# Altium footprint library PBL - THD Packages.PcbLib: 160 footprints (part 7 of 10)
Each footprint in its own frame and in the unit in brackets; x right, y up, seen from the top. Pads: shape width x height; smd on the part's side, far side on the other; paste and mask are expansions set on the pad; w line width, h text height; cw(c..) or ccw(c..) is an arc to the next point about the centre after c.
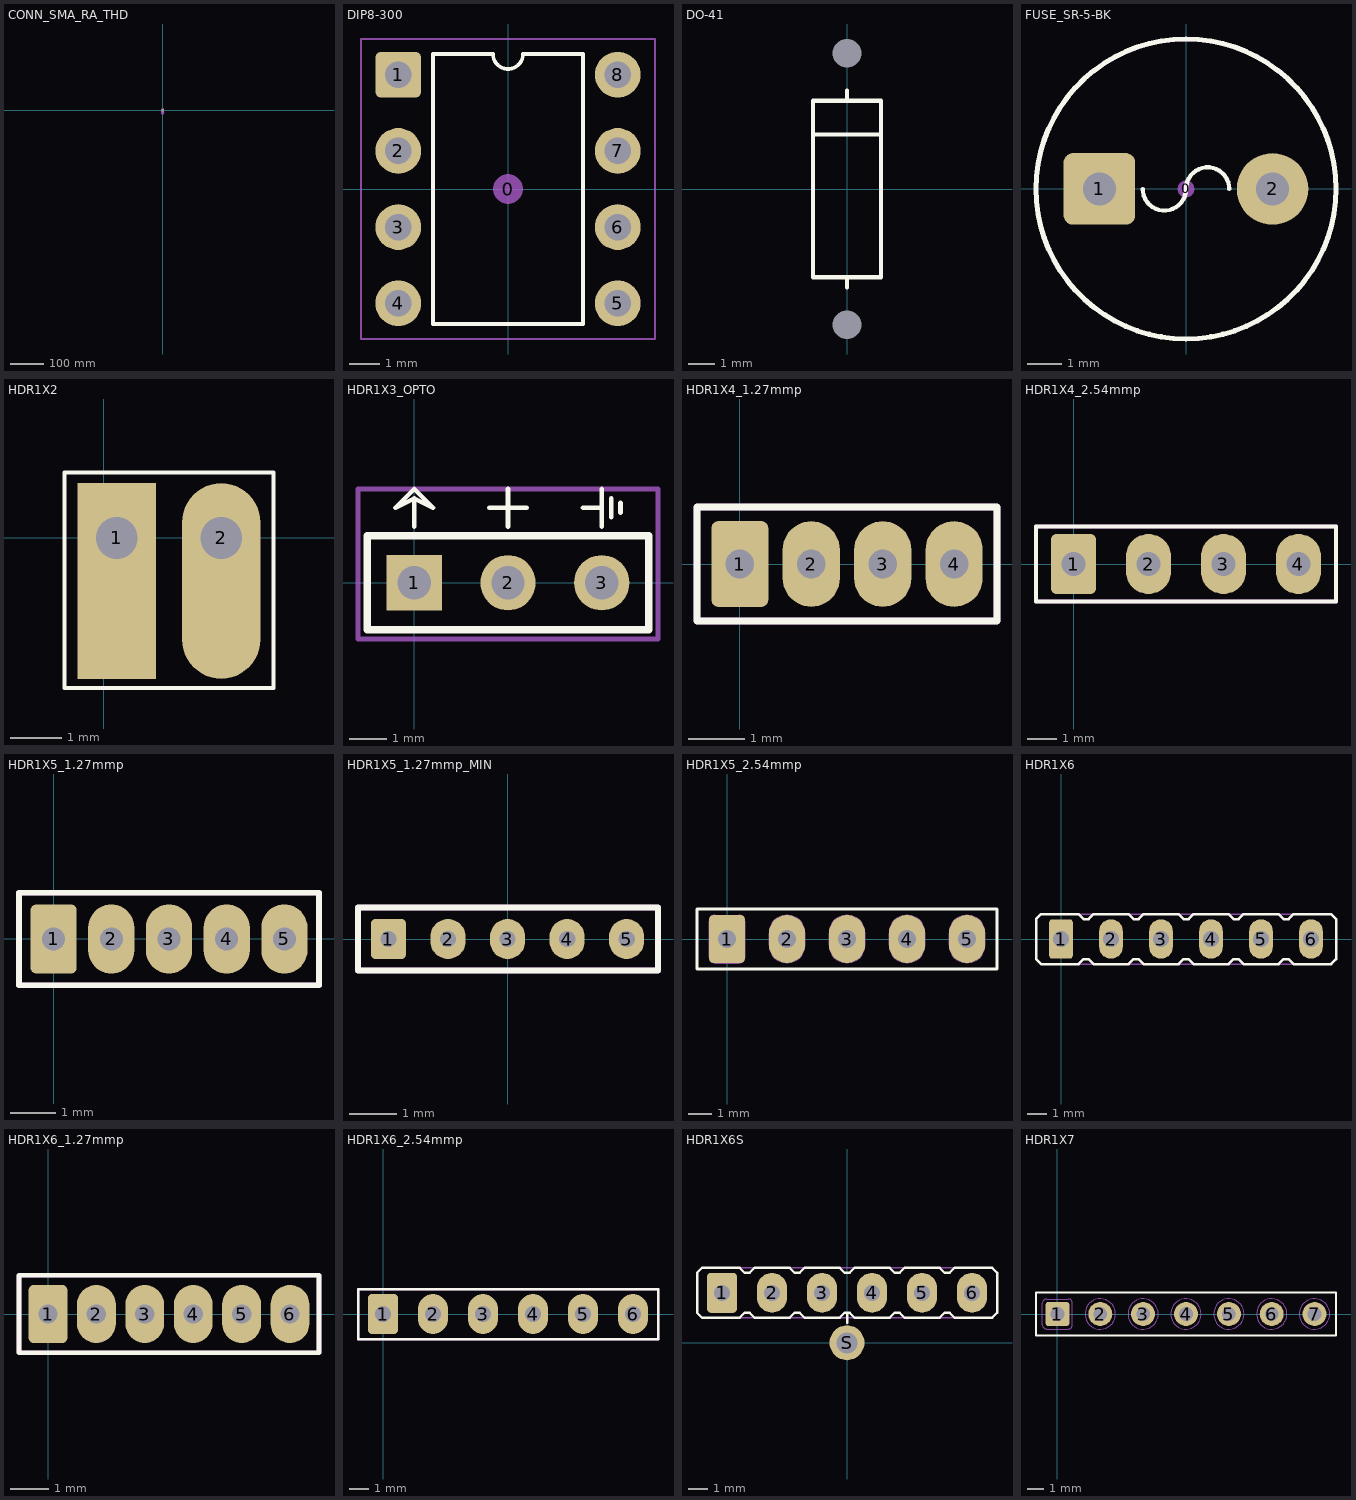
[diagram p6: the footprints below, top view; thin cyan lines are the x and y axes]

## CONN_SMA_RA_THD [mm]
height 10.43
pads (5):
  round 2.5 hole 1.5: 1(0,0)
  round 2.5 hole 1.6: 2(-2.54,-2.54) 2(-2.54,2.54) 2(2.54,-2.54) 2(2.54,2.54)
13 - 3D Top Side:
  drawing of 402 lines, arcs and shapes, not listed
3D body: height 10.43, standoff -3.41, extent -3.173,-11.05 3.167,3.15

## DIP8-300 [mil] "DIP, 8-Leads, 0.300\" lead span , 0.100\" lead pitch, IPC Density A"
height 210
pads (9):
  round 39.37 on Mech15: 0(0,0)
  rrect25% 60x60 hole 35: 1(-144,150)
  round 60 hole 35: 2(-144,50) 3(-144,-50) 4(-144,-150) 5(144,-150) 6(144,-50) 7(144,50) 8(144,150)
Top Overlay:
  lines w5: -98.43,-177.17 98.43,-177.17 98.43,177.17 19.69,177.17 cw(c0,177.17) -19.69,177.17 -98.43,177.17 -98.43,-177.17
13 - 3D Top Side:
  lines w3: -98.43,-177.17 -98.43,177.17 -19.69,177.17 ccw(c0,177.17) 19.69,177.17 98.43,177.17 98.43,-177.17 -98.43,-177.17
15 - Top Courtyards:
  lines w3: -192.91,-196.85 192.91,-196.85 192.91,196.85 -192.91,196.85 -192.91,-196.85
3D body: height 165, standoff -105, extent -149,-225 161,225

## DO-41 [mil] "Diode, thru-hole"
height 106.3
pads (2):
  round 0 / inner round 0 / far side round 100 hole 42 unplated: A(0,-200) K(0,200)
Top Overlay:
  lines w6: -50,80 50,80 ; 0,-145 0,-130 ; 0,130 0,145 ; -50,-130 50,-130 50,130 -50,130 -50,-130
3D body: height 100.5, standoff -100, extent -51,-215 50,215

## FUSE_SR-5-BK [mm]
height 9.3
pads (3):
  round 0.5 on Mech15: 0(0,0)
  rrect25% 2.1x2.1 hole 0.965: 1(-2.54,0)
  round 2.1 hole 0.965: 2(2.54,0)
Top Overlay:
  circle w0.152: c0,0 r4.4
  lines w0.127: -1.27,0 ccw(c-0.635,0) 0,0 cw(c0.635,0) 1.27,0
13 - 3D Top Side:
  circle w0.127: c0,-0.003 r4.4
3D body: height 8.29, standoff -2.55, extent -4.35,-4.321 4.35,4.315

## HDR1X2 [mil] "Connector; Header; 2 Position"
pads (2):
  rect 60x150 hole 32 copper offset 0,-33: 1(10,0)
  oval 60x150 hole 32 copper offset 0,-33: 2(90,0)
Top Overlay:
  lines w3: -30,-115 130,-115 130,50 -30,50 -30,-115

## HDR1X3_OPTO [mm] "Connector; Header; 3 Position"
pads (3):
  rect 1.5x1.5 hole 0.9: 1(0,0)
  round 1.5 hole 0.9: 2(2.54,0) 3(5.08,0)
Top Overlay:
  lines w0.127: 0,1.524 0,2.286 ; 2.032,2.032 3.048,2.032 ; 2.54,1.524 2.54,2.54 ; 4.572,2.032 5.08,2.032 5.08,2.54 5.08,1.524 ; 5.334,1.778 5.334,2.286 ; 5.588,1.905 5.588,2.159 ; 0,2.286 0.508,2.032 0,2.54 -0.508,2.032 0,2.286
  lines w0.2: -1.27,-1.27 6.35,-1.27 6.35,1.27 -1.27,1.27 -1.27,-1.27
15 - Top Courtyards:
  lines w0.127: -1.524,-1.524 6.604,-1.524 6.604,2.54 -1.524,2.54 -1.524,-1.524

## HDR1X4_1.27mmp [mil] "Connector; Header; 4 Position, 0.050\" pitch"
pads (4):
  rrect25% 40x60 hole 20: 1(0,0)
  oval 40x60 hole 20: 2(50,0) 3(100,0) 4(150,0)
Top Overlay:
  lines w5: -30,-40 -30,40 180,40 180,-40 -30,-40
13 - 3D Top Side:
  lines w5: -30,-40 -30,40 180,40 180,-40 -30,-40

## HDR1X4_2.54mmp [mil] "Connector; Header; 4 Position 0.100\" pitch"
pads (4):
  rrect25% 60x80 hole 32: 1(0,0)
  oval 60x80 hole 32: 2(100,0) 3(200,0) 4(300,0)
Top Overlay:
  lines w5: -50,-50 350,-50 350,50 -50,50 -50,-50
13 - 3D Top Side:
  lines w5: -50,-50 -50,50 350,50 350,-50 -50,-50

## HDR1X5_1.27mmp [mil] "Connector; Header; 5 Position, 0.050\" pitch"
pads (5):
  rrect25% 40x60 hole 20 mask+5: 1(0,0)
  oval 40x60 hole 20 mask+5: 2(50,0) 3(100,0) 4(150,0) 5(200,0)
Top Overlay:
  lines w5: -30,-40 230,-40 230,40 -30,40 -30,-40
13 - 3D Top Side:
  lines w5: -30,-40 230,-40 230,40 -30,40 -30,-40
3D body: height -3, standoff -5, extent -19.84,-19.96 20,19.96

## HDR1X5_1.27mmp_MIN [mm] "Programming connector target; 5 Position with minimally sized pads, 0.050\" pitch"
pads (5):
  rrect25% 0.75x0.85 hole 0.35 mask+0.1: 1(-2.54,0)
  oval 0.75x0.85 hole 0.35 mask+0.1: 2(-1.27,0) 3(0,0) 4(1.27,0) 5(2.54,0)
Top Overlay:
  lines w0.127: -3.19,-0.675 3.21,-0.675 3.21,0.675 -3.19,0.675 -3.19,-0.675
13 - 3D Top Side:
  lines w0.127: -3.19,-0.675 3.21,-0.675 3.21,0.675 -3.19,0.675 -3.19,-0.675
3D body: height -0.08, standoff -0.13, extent -3.044,-0.507 -2.032,0.507

## HDR1X5_2.54mmp [mil] "Connector; Header; 5 Position 0.100\" pitch"
pads (5):
  rrect25% 60x80 hole 30: 1(0,0)
  oval 60x80 hole 30: 2(100,0) 3(200,0) 4(300,0) 5(400,0)
Top Overlay:
  lines w5: -50,-50 -50,50 450,50 450,-50 -50,-50
13 - 3D Top Side:
  circle w1.97: c0,0 r15
  circle w1.97: c100,0 r15
  circle w1.97: c200,0 r15
  circle w1.97: c300,0 r15
  circle w1.97: c400,0 r15
  lines w1.97: -30,-30 ccw(c-20,-30) -20,-40 20,-40 ccw(c20,-30) 30,-30 30,30 ccw(c20,30) 20,40 -20,40 ccw(c-20,30) -30,30 -30,-30 ; 70,-10 ccw(c100,-10) 130,-10 130,10 ccw(c100,10) 70,10 70,-10 ; 170,-10 ccw(c200,-10) 230,-10 230,10 ccw(c200,10) 170,10 170,-10 ; 270,-10 ccw(c300,-10) 330,-10 330,10 ccw(c300,10) 270,10 270,-10 ; 370,-10 ccw(c400,-10) 430,-10 430,10 ccw(c400,10) 370,10 370,-10

## HDR1X6 [mm] "Connector; Header; 6 Position"
pads (6):
  rrect25% 1.2x2 hole 0.813: 1(0,0)
  oval 1.2x2 hole 0.813: 2(2.54,0) 3(5.08,0) 4(7.62,0) 5(10.16,0) 6(12.7,0)
Top Overlay:
  lines w0.127: -1.27,-1.016 -1.27,1.016 -1.016,1.27 0.889,1.27 1.143,1.016 1.397,1.016 1.651,1.27 3.429,1.27 3.683,1.016 3.937,1.016 4.191,1.27 5.969,1.27 6.223,1.016 6.477,1.016 6.731,1.27 8.509,1.27 8.763,1.016 9.017,1.016 9.271,1.27 11.049,1.27 11.303,1.016 11.557,1.016 11.811,1.27 13.716,1.27 13.97,1.016 13.97,-1.016 13.716,-1.27 11.811,-1.27 11.557,-1.016 11.303,-1.016 11.049,-1.27 9.271,-1.27 9.017,-1.016 8.763,-1.016 8.509,-1.27 6.731,-1.27 6.477,-1.016 6.223,-1.016 5.969,-1.27 4.191,-1.27 3.937,-1.016 3.683,-1.016 3.429,-1.27 1.651,-1.27 1.397,-1.016 1.143,-1.016 0.889,-1.27 -1.016,-1.27 -1.27,-1.016
13 - 3D Top Side:
  lines w0.076: -1.27,-1.016 -1.016,-1.27 13.716,-1.27 13.97,-1.016 13.97,1.016 13.716,1.27 -1.016,1.27 -1.27,1.016 -1.27,-1.016

## HDR1X6_1.27mmp [mil] "Connector; Header; 6 Position, 0.050\" pitch"
pads (6):
  rrect25% 40x60 hole 20: 1(0,0)
  oval 40x60 hole 20: 2(50,0) 3(100,0) 4(150,0) 5(200,0) 6(250,0)
Top Overlay:
  lines w5: -30,-40 280,-40 280,40 -30,40 -30,-40
Bottom Solder:
  rectangle: 0,-30 250,30
13 - 3D Top Side:
  lines w5: -30,-40 280,-40 280,40 -30,40 -30,-40

## HDR1X6_2.54mmp [mil] "Connector; Header; 6 Position 0.100\" pitch"
pads (6):
  rrect25% 60x80 hole 32: 1(0,0)
  oval 60x80 hole 32: 2(100,0) 3(200,0) 4(300,0) 5(400,0) 6(500,0)
Top Overlay:
  lines w5: -50,-50 550,-50 550,50 -50,50 -50,-50
13 - 3D Top Side:
  lines w5: -50,-50 -50,50 550,50 550,-50 -50,-50

## HDR1X6S [mil] "Connector; Special 6-position header with shield term"
pads (7):
  rrect25% 60x80 hole 32: 1(-250,100)
  oval 60x80 hole 32: 2(-150,100) 3(-50,100) 4(50,100) 5(150,100) 6(250,100)
  round 70 hole 42: S(0,0)
Top Overlay:
  lines w5: 0,40 0,60 ; -300,60 -300,140 -290,150 -215,150 -205,140 -195,140 -185,150 -115,150 -105,140 -95,140 -85,150 -15,150 -5,140 5,140 15,150 85,150 95,140 105,140 115,150 185,150 195,140 205,140 215,150 290,150 300,140 300,60 290,50 215,50 205,60 195,60 185,50 115,50 105,60 95,60 85,50 15,50 5,60 -5,60 -15,50 -85,50 -95,60 -105,60 -115,50 -185,50 -195,60 -205,60 -215,50 -290,50 -300,60
13 - 3D Top Side:
  lines w3: -300,60 -290,50 290,50 300,60 300,140 290,150 -290,150 -300,140 -300,60

## HDR1X7 [mil] "Connector; Header; 7 Position"
pads (7):
  rrect25% 56x56 / inner rrect25% 56x56 / far side rrect25% 72x72 hole 32: 1(0,0)
  round 56 / inner round 56 / far side round 72 hole 32: 2(100,0) 3(200,0) 4(300,0) 5(400,0) 6(500,0) 7(600,0)
Top Overlay:
  lines w5: -50,-50 -50,50 650,50 650,-50 -50,-50
13 - 3D Top Side:
  circle w1.97: c600,0 r35.43
  circle w1.97: c600,0 r16
  circle w1.97: c500,0 r35.43
  circle w1.97: c500,0 r16
  circle w1.97: c400,0 r35.43
  circle w1.97: c400,0 r16
  circle w1.97: c300,0 r35.43
  circle w1.97: c300,0 r16
  circle w1.97: c200,0 r35.43
  circle w1.97: c200,0 r16
  circle w1.97: c100,0 r16
  circle w1.97: c100,0 r35.43
  circle w1.97: c0,0 r16
  lines w1.97: -35,-25 ccw(c-25,-25) -25,-35 25,-35 ccw(c25,-25) 35,-25 35,25 ccw(c25,25) 25,35 -25,35 ccw(c-25,25) -35,25 -35,-25